# Altium schematic symbol library LED-Optocupler.SchLib: 114 symbols (part 1 of 2)
Pins are listed as number, name and electrical type; pins without a type are passive.

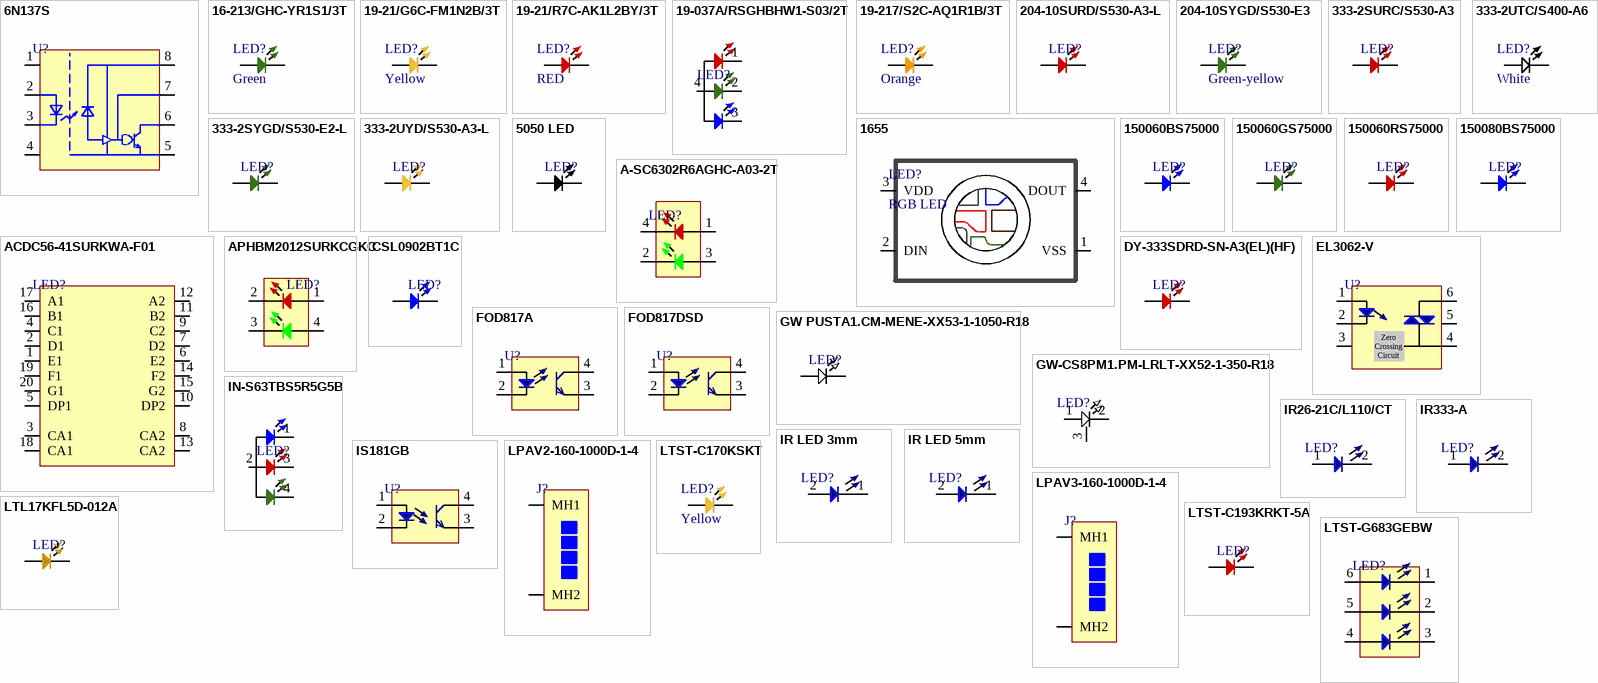
[diagram p0: symbols 6N137S to LTST-G683GEBW]

## 6N137S
designator U?
SOP-8 Logic Output Optoisolators ROHS; Manufacturer: UMW; Manufacturer Part Number: 6N137S; Package: SOP-8; LCSC Part Number: C5123515; Item Type: Optoisolators; ComponentLink1Description: LCSC; ComponentLink1URL: https://www.lcsc.com/product-detail/Logic-Output-Optoisolators_UMW-Youtai-Semiconductor-Co-Ltd-6N137S_C5123515.html
footprint SOP-8 (S Type)
pins: 1 NC, 2 A, 3 C, 4 NC, 5 GND, 6 VO, 7 VE, 8 VCC

## 16-213/GHC-YR1S1/3T
designator LED?, comment Green
Green 520~535nm 0402 Light Emitting Diodes (LED) RoHS; Manufacturer: Everlight Elec; Manufacturer Part Number: 16-213/GHC-YR1S1/3T; Luminous Intensity (IF=20mA): 112~285mcd; Package: 0402; Illumination Color: Green; Dominant Wavelength / Coordinate rank: 520~535nm; Mounting Type: Surface Mount; ComponentLink1Description: LCSC; ComponentLink1URL: https://www.lcsc.com/product-detail/Light-Emitting-Diodes-LED_Everlight-Elec-16-213-GHC-YR1S1-3T_C74338.html; LCSC Part Number: C74338; Item Type: LED
footprint LED-0402
pins: 1, 2

## 19-21/G6C-FM1N2B/3T
designator LED?, comment Yellow
Yellow-Green 572nm LED Indication - Discrete 2.05V 0603 (1608 Metric); Manufacturer: Everlight Elec; Manufacturer Part Number: 19-21/G6C-FM1N2B/3T; Package: 0603; LCSC Part Number: C93689; Item Type: LED; ComponentLink1Description: LCSC; ComponentLink1URL: https://www.lcsc.com/product-detail/Light-Emitting-Diodes-LED_Everlight-Elec-19-21-G6C-FM1N2B-3T_C93689.html
footprint LED-0603
pins: 1, 2

## 19-21/R7C-AK1L2BY/3T
designator LED?, comment RED
Red 632nm LED Indication - Discrete 2.05V 0603 (1608 Metric); Manufacturer: Everlight Elec; Manufacturer Part Number: 19-21/R7C-AK1L2BY/3T; Package: 0603; LCSC Part Number: C1322287; Item Type: LED; ComponentLink1Description: LCSC; ComponentLink1URL: https://www.lcsc.com/product-detail/Light-Emitting-Diodes-LED_Everlight-Elec-19-21-R7C-AK1L2BY-3T_C1322287.html
footprint LED-0603
pins: 1, 2

## 19-037A/RSGHBHW1-S03/2T
designator LED?
RGB 0606 Light Emitting Diodes (LED) ROHS; Manufacturer: Everlight Elec; Manufacturer Part Number: 19-037A/RSGHBHW1-S03/2T; Item Type: RGB LED; Package: 0606; LCSC Part Number: C282128; ComponentLink1Description: LCSC; ComponentLink1URL: https://www.lcsc.com/product-detail/Light-Emitting-Diodes-LED_Everlight-Elec-19-037A-RSGHBHW1-S03-2T_C282128.html
footprint LED-0606
pins: 1 -RED, 2 -GREEN, 3 -BLUE, 4 +

## 19-217/S2C-AQ1R1B/3T
designator LED?, comment Orange
0603(H=0.4mm) λD=600.5~612.5nm VR=5V VF=1.7V~2.2V IF=25mA PD=60mW; Manufacturer: Everlight; Manufacturer Part Number: 19-217/S2C-AQ1R1B/3T; Item Type: LED; Supplier 1: Digi-Key; RoHS: No; Category: LEDs; Supplier Part Number 1: 1080-19-217/S2C-AQ1R1B/3TTR-ND; LCSC Part Number: C146215; ComponentLink1Description: LCSC; ComponentLink1URL: https://www.lcsc.com/product-detail/Light-Emitting-Diodes-LED_Everlight-Elec-19-217-S2C-AQ1R1B-3T_C146215.html
footprint LED-0603
pins: 1, 2

## 204-10SURD/S530-A3-L
designator LED?
20mA 624nm -40℃~+85℃ Red 40° 3mm圆形灯头 60mW Plugin,D=3mm Light Emitting Diodes (LED) ROHS; Manufacturer: Everlight Elec; Manufacturer Part Number: 204-10SURD/S530-A3-L; Package: Plugin,D=3mm; LCSC Part Number: C99771; Item Type: LED; ComponentLink1Description: LCSC; ComponentLink1URL: https://www.lcsc.com/product-detail/Light-Emitting-Diodes-LED_Everlight-Elec-204-10SURD-S530-A3-L_C99771.html
footprint TH LED Red 3MM
pins: 1, 2

## 204-10SYGD/S530-E3
designator LED?, comment Green-yellow
LED Single Standard Yellow Green 573nm 25mA 2-Pin T-1 Bag; Manufacturer: Everlight; Manufacturer Part Number: 204-10SYGD/S530-E3; Viewing Angle: 45°; Luminous Intensity: 100mcd; Forward Voltage: 2.4V; Lens Style: Diffused,Colored; Power Dissipation: 60W; Number of Elements: 1; Reverse Voltage: 5V; Supplier: Digikey; Supplier Part Number: 1080-204-10SYGD/S530-E3TR-ND; RoHS: Yes; Pricing: 3000=0.10482, 5000=0.09847, 10000=0.09212, 25000=0.08449, 50000=0.08132, 100000=0.07941 (USD); Mounting Technology: Through Hole; Case/Package: T; Pins: 2; Min Operating Temperature: -40°C; Max Operating Temperature: 85°C; Forward Current: 25mA; Packaging: Tape and Reel; Dominant Wavelength: 573nm; Wavelength: 573nm; Length: 4mm; Depth: 4mm; Radiation Hardening: No; RoHS Compliant: Yes; ComponentLink1URL: https://datasheet.ciiva.com/26901/getdatasheetpartid-707371-26901329.pdf?src-supplier=Verical; ComponentLink1Description: https://datasheet.ciiva.com/26901/getdatasheetpartid-707371-26901329.pdf?src-supplier=Verical; LCSC Part Number: C85161; Item Type: LED
footprint TH LED Green 3MM
pins: 1, 2

## 333-2SURC/S530-A3
designator LED?
LED RED CLEAR 5MM ROUND T/H; Manufacturer: Everlight; Manufacturer Part Number: 333-2SURC/S530-A3; Item Type: LEDs; Supplier: Mouser; LCSC Part Number: C125756; RoHS: Yes; Stock: 2460; Pricing: 1=0.45, 10=0.259, 50=0.259, 100=0.127, 1000=0.11, 10000=0.089 (USD); ComponentLink1URL: https://datasheet.ciiva.com/14183/07501489-14183693.pdf?src-supplier=Distrelec; ComponentLink1Description: https://datasheet.ciiva.com/14183/07501489-14183693.pdf?src-supplier=Distrelec; ComponentLink2URL: https://datasheet.ciiva.com/2119/333-2surc-s530-a3-2119388.pdf?src-supplier=Digikey; ComponentLink2Description: https://datasheet.ciiva.com/2119/333-2surc-s530-a3-2119388.pdf?src-supplier=Digikey
footprint TH LED 5mm_
pins: 1, 2

## 333-2SYGD/S530-E2-L
designator LED?
333-2 Series Yellow Green 5 x 5.9 x 8.6 mm 30° 80 mcd Diffused 2.4 V LED; Manufacturer: Everlight; Manufacturer Part Number: 333-2SYGD/S530-E2-L; Supplier: Future Electronics; LCSC Part Number: C99697; Item Type: LED; Pricing: 500=0.0295, 2000=0.0286, 7500=0.0277, 20000=0.0271, 50000=0.0261 (USD); ComponentLink1URL: https://datasheet.octopart.com/333-2SYGD-S530-E2-L-Everlight-datasheet-27835065.pdf?src-supplier=Future+Electronics; ComponentLink1Description: https://datasheet.octopart.com/333-2SYGD-S530-E2-L-Everlight-datasheet-27835065.pdf?src-supplier=Future+Electronics
footprint TH LED 5mm Green
pins: 1, 2

## 333-2UTC/S400-A6
designator LED?, comment White
Colorless transparence -40℃~+85℃ White light 15° 100mW Plugin,D=5mm Light Emitting Diodes (LED) ROHS; Manufacturer: Everlight Elec; Manufacturer Part Number: 333-2UTC/S400-A6; Package: Plugin,D=5mm; LCSC Part Number: C99695; Item Type: LED; ComponentLink1Description: LCSC; ComponentLink1URL: https://www.lcsc.com/product-detail/Light-Emitting-Diodes-LED_Everlight-Elec-333-2UTC-S400-A6_C99695.html
footprint TH LED 5mm_
pins: 1 -, 2 +

## 333-2UYD/S530-A3-L
designator LED?
LED YELLOW DIFFUSED 5MM T/H; Manufacturer: Everlight; Manufacturer Part Number: 333-2UYD/S530-A3-L; Supplier: Digikey; LCSC Part Number: C88602; RoHS: No; Item Type: LED
footprint TH LED 5mm Yellow
pins: 1, 2

## 1655
designator LED?, comment RGB LED
ADDRESS LED DISC SERIAL RGB 1=10; Manufacturer: Adafruit Industries; Manufacturer Part Number: 1655; Color: Blue,Green,Red; Number of LEDs: 10; Item Type: RGB-LED; Supplier 1: Digi-Key; Stock 1: 2943; Mount: Surface Mount; Length: 5mm; Width: 5mm; ComponentLink1URL: https://cdn-shop.adafruit.com/product-files/1138/SK6812+LED+datasheet+.pdf?src-supplier=Digi-Key; ComponentLink1Description: https://cdn-shop.adafruit.com/product-files/1138/SK6812+LED+datasheet+.pdf?src-supplier=Digi-Key; ComponentLink2URL: http://www.mouser.com/ds/2/737/SK6812_LED_datasheet_-953546.pdf?src-supplier=Mouser; ComponentLink2Description: http://www.mouser.com/ds/2/737/SK6812_LED_datasheet_-953546.pdf?src-supplier=Mouser; Supplier Part Number 1: 1528-1104-ND; Pricing 1: 1=4.5 (USD)
footprint 1655 (RGB LED)
pins: 1 VSS, 2 DIN, 3 VDD, 4 DOUT

## 5050 LED
designator LED?
-; ComponentLink1Description: LCSC; ComponentLink1URL: *
footprint 5050 LED
pins: A, K

## 150060BS75000
designator LED?
LED BLUE CLEAR 0603 SMD; Manufacturer: Wurth Electronics; Manufacturer Part Number: 150060RS75000; Item Type: LEDs; Color: Red; Lens Color: Colorless; Viewing Angle: 140°; Lens Style: Clear,Flat,Rectangular; Luminous Intensity: 250mcd; Forward Current: 30mA; Forward Voltage: 2V; Wavelength: 625nm; Test Current: 20mA; Max Reverse Voltage (DC): 5V; Power Dissipation: 72mW; Lens Size: 0.7mm; Supplier: Rs; LCSC Part Number: C5197644; RoHS: Yes; Stock: 15900; Mounting Technology: Surface Mount; Case/Package: 0603; Case Code (Metric): 1608; Case Code (Imperial): 0603; Min Operating Temperature: -40°C; Max Operating Temperature: 85°C; Package Quantity: 1; Packaging: Cut Tape; Dominant Wavelength: 625nm; Series: WL-SMCW; Lens Transparency: Clear; Reverse Voltage: 5V; Length: 1.6mm; Width: 0.8mm; Height: 0.8mm; RoHS Compliant: Yes; Reach SVHC Compliant: Unknown; ComponentLink1URL: https://datasheet.ciiva.com/29563/150060rs75000-29563040.pdf?src-supplier=Digikey; ComponentLink1Description: https://datasheet.ciiva.com/29563/150060rs75000-29563040.pdf?src-supplier=Digikey; ComponentLink2URL: https://datasheet.ciiva.com/29279/759428-da-01-en-chipled-0603-w-kl-rot-150060rs75000-29279196.pdf?src-supplier=Conrad; ComponentLink2Description: https://datasheet.ciiva.com/29279/759428-da-01-en-chipled-0603-w-kl-rot-150060rs75000-29279196.pdf?src-supplier=Conrad
footprint LED-0603
pins: 1, 2

## 150060GS75000
designator LED?
LED GREEN CLEAR 0603 SMD; Manufacturer: Wurth Electronics; Manufacturer Part Number: 150060GS75000; Item Type: LEDs; Lens Color: Colorless; Wavelength: 520nm; Viewing Angle: 140°; Lens Style: Clear,Flat,Rectangular; Luminous Intensity: 430mcd; Forward Current: 30mA; Forward Voltage: 3.2V; Test Current: 20mA; Max Reverse Voltage (DC): 5V; Output Current: 10uA; Power Dissipation: 105mW; Lens Size: 0.7mm; Supplier: Rs; LCSC Part Number: C5252984; RoHS: Yes; Stock: 14000; Mounting Technology: Surface Mount; Case/Package: 0603; Color: Green; Case Code (Metric): 1608; Case Code (Imperial): 0603; Min Operating Temperature: -40°C; Max Operating Temperature: 85°C; Package Quantity: 1; Packaging: Cut Tape; Dominant Wavelength: 520nm; Series: WL-SMCW; Lens Transparency: Clear; Reverse Voltage: 5V; Length: 1.6mm; Width: 0.8mm; Height: 0.8mm; Lead Free: Lead Free; RoHS Compliant: Yes; Reach SVHC Compliant: Unknown; ComponentLink1URL: https://datasheet.ciiva.com/29562/150060gs75000-29562868.pdf?src-supplier=Digikey; ComponentLink1Description: https://datasheet.ciiva.com/29562/150060gs75000-29562868.pdf?src-supplier=Digikey; ComponentLink2URL: https://datasheet.ciiva.com/29279/759427-da-01-en-chipled-0603-w-kl-gruen-150060gs75000-29279201.pdf?src-supplier=Conrad; ComponentLink2Description: https://datasheet.ciiva.com/29279/759427-da-01-en-chipled-0603-w-kl-gruen-150060gs75000-29279201.pdf?src-supplier=Conrad; ComponentLink3URL: https://datasheet.ciiva.com/29562/150060gs75000-29562869.pdf?src-supplier=Digikey; ComponentLink3Description: https://datasheet.ciiva.com/29562/150060gs75000-29562869.pdf?src-supplier=Digikey; ComponentLink4URL: https://datasheet.ciiva.com/29562/150060gs75000-29562870.pdf?src-supplier=Digikey; ComponentLink4Description: https://datasheet.ciiva.com/29562/150060gs75000-29562870.pdf?src-supplier=Digikey
footprint LED-0603
pins: 1, 2

## 150060RS75000
designator LED?
LED RED CLEAR 0603 SMD; Manufacturer: Wurth Electronics; Manufacturer Part Number: 150060RS75000; Item Type: LEDs; Lens Color: Colorless; Viewing Angle: 140°; Lens Style: Clear,Flat,Rectangular; Luminous Intensity: 250mcd; Forward Current: 30mA; Forward Voltage: 2V; Wavelength: 625nm; Test Current: 20mA; Max Reverse Voltage (DC): 5V; Power Dissipation: 72mW; Lens Size: 0.7mm; Supplier: Rs; LCSC Part Number: C3030991; RoHS: Yes; Stock: 15900; Mounting Technology: Surface Mount; Case/Package: 0603; Color: Red; Case Code (Metric): 1608; Case Code (Imperial): 0603; Min Operating Temperature: -40°C; Max Operating Temperature: 85°C; Package Quantity: 1; Packaging: Cut Tape; Dominant Wavelength: 625nm; Series: WL-SMCW; Lens Transparency: Clear; Reverse Voltage: 5V; Length: 1.6mm; Width: 0.8mm; Height: 0.8mm; RoHS Compliant: Yes; Reach SVHC Compliant: Unknown; ComponentLink1URL: https://datasheet.ciiva.com/29563/150060rs75000-29563040.pdf?src-supplier=Digikey; ComponentLink1Description: https://datasheet.ciiva.com/29563/150060rs75000-29563040.pdf?src-supplier=Digikey; ComponentLink2URL: https://datasheet.ciiva.com/29279/759428-da-01-en-chipled-0603-w-kl-rot-150060rs75000-29279196.pdf?src-supplier=Conrad; ComponentLink2Description: https://datasheet.ciiva.com/29279/759428-da-01-en-chipled-0603-w-kl-rot-150060rs75000-29279196.pdf?src-supplier=Conrad
footprint LED-0603
pins: 1, 2

## 150080BS75000
designator LED?
LED BLUE CLEAR 0805 SMD; Manufacturer: Wurth Electronics; Manufacturer Part Number: 150080BS75000; Item Type: LEDs; Lens Color: Colorless; Luminous Intensity: 145mcd; Viewing Angle: 140°; Forward Voltage: 3.2V; Wavelength: 470nm; Lens Style: Clear,Flat,Rectangular; Forward Current: 30mA; Test Current: 20mA; Reverse Voltage: 5V; Power Dissipation: 105mW; Lens Size: 1.25mm; Supplier: Digikey; Supplier Part Number: 732-4982-1-ND; RoHS: Yes; Stock: 93649; Pricing: 1=0.18, 50=0.176, 100=0.151, 500=0.131 (USD); Mounting Technology: Surface Mount; Case/Package: 0805; Color: Blue; Case Code (Metric): 2012; Case Code (Imperial): 0805; Min Operating Temperature: -40°C; Max Operating Temperature: 85°C; Series: WL-SMCW; Package Quantity: 1; Packaging: Cut Tape; Dominant Wavelength: 470nm; Lens Transparency: Clear; Max Reverse Voltage (DC): 5V; Length: 2mm; Width: 1.25mm; Height: 0.8mm; RoHS Compliant: Yes; Reach SVHC Compliant: Unknown; Lead Free: Lead Free; ComponentLink1URL: https://datasheet.ciiva.com/22656/1740214-22656954.pdf?src-supplier=Element14; ComponentLink1Description: https://datasheet.ciiva.com/22656/1740214-22656954.pdf?src-supplier=Element14; ComponentLink2URL: https://datasheet.ciiva.com/23843/150080bs75000-23843251.pdf?src-supplier=Newark; ComponentLink2Description: https://datasheet.ciiva.com/23843/150080bs75000-23843251.pdf?src-supplier=Newark; ComponentLink3URL: https://datasheet.ciiva.com/29279/759433-da-01-en-chipled-0805-w-kl-blau-150080bs75000-29279203.pdf?src-supplier=Conrad; ComponentLink3Description: https://datasheet.ciiva.com/29279/759433-da-01-en-chipled-0805-w-kl-blau-150080bs75000-29279203.pdf?src-supplier=Conrad; ComponentLink4URL: https://datasheet.ciiva.com/29562/150080bs75000-29562923.pdf?src-supplier=Digikey; ComponentLink4Description: https://datasheet.ciiva.com/29562/150080bs75000-29562923.pdf?src-supplier=Digikey; ComponentLink5URL: https://datasheet.ciiva.com/29562/150080bs75000-29562922.pdf?src-supplier=Digikey; ComponentLink5Description: https://datasheet.ciiva.com/29562/150080bs75000-29562922.pdf?src-supplier=Digikey
footprint LED-0805
pins: 1, 2

## A-SC6302R6AGHC-A03-2T
designator LED?
Colorless transparent lens -40℃~+85℃ Positive Stick Red,Green 120° SMD-4P,3.5x2.8mm LED Indication - Discrete ROHS; Manufacturer: Amicc; Manufacturer Part Number: A-SC6302R6AGHC-A03-2T; Package: SMD-4P,3.5x2.8mm; LCSC Part Number: C5355456; Item Type: LED; ComponentLink1Description: LCSC; ComponentLink1URL: https://jlcpcb.com/partdetail/Amicc-A_SC6302R6AGHC_A032T/C5355456
footprint A-SC6302R6AGHC-A03-2T
pins: 1, 2, 3, 4

## ACDC56-41SURKWA-F01
designator LED?
DISPLAY 7SEG 0.56" DBL RED 20SMD; Manufacturer: Kingbright; Manufacturer Part Number: ACDC56-41SURKWA-F01; Item Type: 7-Segment LED; Supplier: Digikey; Supplier Part Number: ACDC56-41SURKWA-F01-ND; RoHS: Yes; Category: LED Displays; Pricing: 2000=2.31795 (USD); ComponentLink1URL: https://datasheet.ciiva.com/12423/acdc56-41surkwa-f01-81627-12423377.pdf?src-supplier=Mouser; ComponentLink1Description: https://datasheet.ciiva.com/12423/acdc56-41surkwa-f01-81627-12423377.pdf?src-supplier=Mouser; ComponentLink2URL: https://datasheet.ciiva.com/2105/acdc56-41surkwa-f01-2105135.pdf?src-supplier=Digikey; ComponentLink2Description: https://datasheet.ciiva.com/2105/acdc56-41surkwa-f01-2105135.pdf?src-supplier=Digikey
footprint ACDC56-41SURKWA-F01
pins: 1 E1, 2 D1, 3 CA1, 4 C1, 5 DP1, 6 E2, 7 D2, 8 CA2, 9 C2, 10 DP2, 11 B2, 12 A2, 13 CA2, 14 F2, 15 G2, 16 B1, 17 A1, 18 CA1, 19 F1, 20 G1

## APHBM2012SURKCGKC
designator LED?
LED GREEN/RED CLEAR 2012 SMD; Manufacturer: Kingbright; Manufacturer Part Number: APHBM2012SURKCGKC; Item Type: LEDs; Power Dissipation: 75mW; Reverse Voltage: 5V; Supplier: Digikey; LCSC Part Number: C5553822; RoHS: Yes; Stock: 110064; Pricing: 1=0.54, 10=0.315, 100=0.2018, 500=0.1577, 1000=0.14419 (USD); ComponentLink1URL: https://datasheet.ciiva.com/12403/aphbm2012surkcgkc-72097-12403908.pdf?src-supplier=Mouser; ComponentLink1Description: https://datasheet.ciiva.com/12403/aphbm2012surkcgkc-72097-12403908.pdf?src-supplier=Mouser; ComponentLink2URL: https://datasheet.ciiva.com/16494/aphbm2012surkcgkc-16494094.pdf?src-supplier=Future+Electronics; ComponentLink2Description: https://datasheet.ciiva.com/16494/aphbm2012surkcgkc-16494094.pdf?src-supplier=Future+Electronics; ComponentLink3URL: https://datasheet.ciiva.com/2121/aphbm2012surkcgkc-2121185.pdf?src-supplier=Digikey; ComponentLink3Description: https://datasheet.ciiva.com/2121/aphbm2012surkcgkc-2121185.pdf?src-supplier=Digikey; ComponentLink4URL: https://datasheet.ciiva.com/14604/70062825-14604012.pdf?src-supplier=Allied+Electronics; ComponentLink4Description: https://datasheet.ciiva.com/14604/70062825-14604012.pdf?src-supplier=Allied+Electronics; ComponentLink5URL: https://datasheet.ciiva.com/2121/aphbm2012surkcgkc-2121186.pdf?src-supplier=Digikey; ComponentLink5Description: https://datasheet.ciiva.com/2121/aphbm2012surkcgkc-2121186.pdf?src-supplier=Digikey; ComponentLink6URL: https://datasheet.ciiva.com/2121/aphbm2012surkcgkc-2121187.pdf?src-supplier=Digikey; ComponentLink6Description: https://datasheet.ciiva.com/2121/aphbm2012surkcgkc-2121187.pdf?src-supplier=Digikey
footprint APHBM2012SURKCGKC
pins: 1, 2, 3, 4

## CSL0902BT1C
designator LED?
LED BLUE CLEAR 0603 SMD; Item Type: LED; ComponentLink1Description: LCSC; Supplier: Rs; Supplier Part Number: 2491101; RoHS: No; Stock: 1975; Pricing: 25=0.537, 50=0.527, 100=0.355, 250=0.349, 1000=0.341 (GBP)
footprint LED-0603
pins: 1, 2

## DY-333SDRD-SN-A3(EL)(HF)
designator LED?
D=5mm LED Indication - Discrete ROHS; Manufacturer: TONYU; Manufacturer Part Number: DY-333SDRD-SN-A3(EL)(HF); Supplier: LCSC; LCSC Part Number: C7470717; RoHS: No; Item Type: LED; Pricing: 10=0.0326, 100=0.0264, 500=0.0221, 1000=0.0197, 5000=0.0178, 10000=0.0169 (USD)
footprint TH LED 5mm_
pins: 1, 2

## EL3062-V
designator U?
Optocoupler Triac AC-OUT 1-CH 600VDRM 6-Pin PDIP Tube; Manufacturer: Everlight; Manufacturer Part Number: EL3062-V; Max Supply Voltage: 1.5V; Number of Channels: 1; RMS Current (Irms): 100mA; Hold Current: 280uA; Approvals: UL,CSA,VDE,NEMKO,FIMKO,SEMKO,DEMKO; Item Type: Optoisolator; Supplier: Digi-Key; Supplier Part Number: EL3062-V-ND; RoHS: Yes; Category: Uncategorized; Pricing: 195=0.75805 (USD); Mounting Technology: Through Hole; Case/Package: DIP; Pins: 6; Min Operating Temperature: -55°C; Max Operating Temperature: 100°C; Packaging: Rail/Tube; Package Quantity: 5; Forward Voltage: 1.5V; Series: -; Radiation Hardening: No; RoHS Compliant: Yes; ComponentLink1URL: https://datasheet.ciiva.com/2093/el30xx-series-2093622.pdf?src-supplier=Digi-Key; ComponentLink1Description: https://datasheet.ciiva.com/2093/el30xx-series-2093622.pdf?src-supplier=Digi-Key
footprint 6 Pin Dip
pins: 1 An, 2 Ca, 3 NC, 4 Terminal, 5 Substrate, 6 Terminal
text: Zero Crossing Circuit

## FOD817A
designator U?
OPTOISOLATOR 5KV TRANSISTOR 4DIP; Manufacturer: ON Semiconductor / Fairchild; Manufacturer Part Number: FOD817A; Item Type: IC; Supplier: Future Electronics; LCSC Part Number: C900909; RoHS: Yes; Stock: 9100; Pricing: 100=0.0832, 500=0.0801, 2500=0.0771, 10000=0.0747, 25000=0.0712 (USD); ComponentLink1URL: https://datasheet.ciiva.com/25620/0900766b810e24fa-25620684.pdf?src-supplier=Rs; ComponentLink1Description: https://datasheet.ciiva.com/25620/0900766b810e24fa-25620684.pdf?src-supplier=Rs; ComponentLink2URL: https://datasheet.ciiva.com/15118/getdatasheetpartid-67083-15118459.pdf?src-supplier=Verical; ComponentLink2Description: https://datasheet.ciiva.com/15118/getdatasheetpartid-67083-15118459.pdf?src-supplier=Verical; ComponentLink3URL: https://datasheet.ciiva.com/27056/2016920-27056231.pdf?src-supplier=Jameco; ComponentLink3Description: https://datasheet.ciiva.com/27056/2016920-27056231.pdf?src-supplier=Jameco; ComponentLink4URL: https://datasheet.ciiva.com/12239/fod817a-12239227.pdf?src-supplier=Mouser; ComponentLink4Description: https://datasheet.ciiva.com/12239/fod817a-12239227.pdf?src-supplier=Mouser; ComponentLink5URL: https://datasheet.ciiva.com/8095/fod817d-8095131.pdf?src-supplier=Avnet; ComponentLink5Description: https://datasheet.ciiva.com/8095/fod817d-8095131.pdf?src-supplier=Avnet; ComponentLink6URL: https://datasheet.ciiva.com/2086/fod814a-2086034.pdf?src-supplier=Digikey; ComponentLink6Description: https://datasheet.ciiva.com/2086/fod814a-2086034.pdf?src-supplier=Digikey; ComponentLink7URL: https://datasheet.ciiva.com/16741/fod817-16741992.pdf?src-supplier=Future+Electronics; ComponentLink7Description: https://datasheet.ciiva.com/16741/fod817-16741992.pdf?src-supplier=Future+Electronics
footprint DIP-4
pins: 1 An, 2 Ca, 3 E, 4 C

## FOD817DSD
designator U?
OPTOISOLATOR 5KV TRANSISTOR 4SMD; Manufacturer: ON Semiconductor / Fairchild; Manufacturer Part Number: FOD817DSD; Item Type: Optocouplers; Supplier: Future Electronics; LCSC Part Number: C241832; RoHS: Yes; Stock: 194000; Pricing: 1000=0.153, 3000=0.148, 5000=0.146, 15000=0.142, 25000=0.138 (USD); ComponentLink1URL: https://datasheet.ciiva.com/2085/fod817-2085872.pdf?src-supplier=Digikey; ComponentLink1Description: https://datasheet.ciiva.com/2085/fod817-2085872.pdf?src-supplier=Digikey; ComponentLink2URL: https://datasheet.ciiva.com/30520/2018343-30520890.pdf?src-supplier=Jameco; ComponentLink2Description: https://datasheet.ciiva.com/30520/2018343-30520890.pdf?src-supplier=Jameco; ComponentLink3URL: https://datasheet.ciiva.com/15118/getdatasheetpartid-110546-15118613.pdf?src-supplier=Verical; ComponentLink3Description: https://datasheet.ciiva.com/15118/getdatasheetpartid-110546-15118613.pdf?src-supplier=Verical; ComponentLink4URL: https://datasheet.ciiva.com/2085/fod817d-2085873.pdf?src-supplier=Digikey; ComponentLink4Description: https://datasheet.ciiva.com/2085/fod817d-2085873.pdf?src-supplier=Digikey; ComponentLink5URL: https://datasheet.ciiva.com/2085/fod817d-2085874.pdf?src-supplier=Digikey; ComponentLink5Description: https://datasheet.ciiva.com/2085/fod817d-2085874.pdf?src-supplier=Digikey; ComponentLink6URL: https://datasheet.ciiva.com/8095/fod817d-8095134.pdf?src-supplier=Avnet; ComponentLink6Description: https://datasheet.ciiva.com/8095/fod817d-8095134.pdf?src-supplier=Avnet; ComponentLink7URL: https://datasheet.ciiva.com/17277/fod817-17277350.pdf?src-supplier=Future+Electronics; ComponentLink7Description: https://datasheet.ciiva.com/17277/fod817-17277350.pdf?src-supplier=Future+Electronics
footprint FOD817DSD
pins: 1 An, 2 Ca, 3 E, 4 C

## GW PUSTA1.CM-MENE-XX53-1-1050-R18
designator LED?
LED OSCONIQ COOL WHT 5000K 3SMD; Manufacturer: ams-OSRAM USA INC.; Manufacturer Part Number: GW PUSTA1.CM-MENE-XX53-1-1050-R18; Package: Custom; Item Type: LED; ComponentLink1Description: Digikey; ComponentLink1URL: https://www.digikey.nl/en/products/detail/ams-osram-usa-inc/GW-PUSTA1-CM-MENE-XX53-1-1050-R18/11643254
footprint GW PUSTA1.CM-MENE-XX53-1-1050-R18
pins: 1 AN+, 2 CA-

## GW-CS8PM1.PM-LRLT-XX52-1-350-R18
designator LED?, comment WHITE  (value not drawn)
White LED 350mA Cool 5700K 80° 1212; Manufacturer: OSRAM Opto Semicon; Manufacturer Part Number: GW CS8PM1.PM-LRLT-XX52-1-350-R18; Package: SMD3030; LCSC Part Number: C2830560; Item Type: LED; ComponentLink1Description: LCSC; ComponentLink1URL: https://www.lcsc.com/product-detail/LED-Indication-Discrete_OSRAM-Opto-Semicon-GW-CS8PM1-PM-LRLT-XX52-1-350-R18_C2830560.html
footprint GW CS8PM1.PM-LRLT-XX52-1-350-R18.
pins: 1, 2, 3

## IN-S63TBS5R5G5B
designator LED?
LED RGB CLEAR 0603 SMD R/A; Manufacturer: Inolux; Manufacturer Part Number: IN-S63TBS5R5G5B; Supplier: Mouser; Supplier Part Number: 743-IN-S63TBS5R5G5B; RoHS: No; Category: LEDs; Stock: 12751; Pricing: 1=0.5, 10=0.328, 50=0.328, 100=0.218, 1000=0.152, 10000=0.141 (USD); Item Type: LED
footprint IN-S63TBS5R5G5B
pins: 1 -BLUE, 2 +, 3 -RED, 4 -GREEN

## IR26-21C/L110/CT
designator LED?
4.25mW/sr @ 20mA 940nm 1.2V 65mA 1206 Infrared (IR) LEDs ROHS; Manufacturer: Everlight Elec; Manufacturer Part Number: IR26-21C/L110/CT; ComponentLink1Description: LCSC; ComponentLink1URL: https://www.lcsc.com/product-detail/Infrared-IR-LEDs_Everlight-Elec-IR26-21C-L110-CT_C131280.html; Package: 1206
footprint LED_1206
pins: 1, 2

## IR333-A
designator LED?
EMITTER IR 940NM 100MA RADIAL; Manufacturer: Everlight; Manufacturer Part Number: IR333-A; Forward Current: 50mA; Forward Voltage: 1.2V; Viewing Angle: 20°; Lens Style: Diffused,Colored,Circular; Number of LEDs: 1; Test Current: 20mA; Power Dissipation: 100mW; Reverse Voltage: 5V; Item Type: Infrared LED; Supplier 1: Digi-Key; RoHS: Yes; Category: LEDs; Stock 1: 73854; Pricing 1: 1=0.54000, 10=0.33000, 100=0.18950, 1000=0.14832, 2000=0.13596, 5000=0.12360, 10000=0.11536, 25000=0.11124 (USD); Mount: Through Hole; Case/Package: Radial; Number of Pins: 2; Min Operating Temperature: -40°C; Max Operating Temperature: 85°C; Packaging: Bulk; Wavelength: 940nm; Package Quantity: 500; Number of Elements: 1; Orientation: Top View; Series: -; Max Power Dissipation: 100mW; Length: 5.9mm; Depth: 5.9mm; RoHS Compliant: Yes; Lead Free: Lead Free; ComponentLink1URL: https://datasheet.ciiva.com/2107/201407061516067600-2107736.pdf?src-supplier=Digi-Key; ComponentLink1Description: https://datasheet.ciiva.com/2107/201407061516067600-2107736.pdf?src-supplier=Digi-Key; ComponentLink2URL: https://datasheet.ciiva.com/48438/ir333-a-eng-tds-48438869.pdf?src-supplier=Distrelec; ComponentLink2Description: https://datasheet.ciiva.com/48438/ir333-a-eng-tds-48438869.pdf?src-supplier=Distrelec; Supplier Part Number 1: 1080-1080-ND; LCSC Part Number: C95407
footprint IR333_A
footprint IR333-A Cut
pins: 1, 2

## IR LED 3mm
designator LED?
IR Led 3mm Through; ComponentLink1Description: Aliexpress; ComponentLink1URL: https://nl.aliexpress.com/item/32950109432.html?spm=a2g0o.productlist.0.0.2d9749ecxdTGvK&algo_pvid=f3c88197-d0dd-4360-badc-ef5a9d1d435b&algo_exp_id=f3c88197-d0dd-4360-badc-ef5a9d1d435b-1&pdp_ext_f=%7B%22sku_id%22%3A%2266309321327%22%7D
footprint TH LED 3mm_
pins: 1, 2

## IR LED 5mm
designator LED?
IR Led 5mm Through; ComponentLink1Description: Aliexpress; ComponentLink1URL: https://nl.aliexpress.com/item/32950109432.html?spm=a2g0o.productlist.0.0.2d9749ecxdTGvK&algo_pvid=f3c88197-d0dd-4360-badc-ef5a9d1d435b&algo_exp_id=f3c88197-d0dd-4360-badc-ef5a9d1d435b-1&pdp_ext_f=%7B%22sku_id%22%3A%2266309321327%22%7D
footprint TH LED 5mm_
pins: 1, 2

## IS181GB
designator U?
Optoisolator Transistor Output 3750Vrms 1 Channel; Manufacturer: Isocom; Manufacturer Part Number: IS181GB; Forward Current: 50mA; Reverse Breakdown Voltage: 6V; Isolation Voltage: 3.75kV; Rise Time: 18000ns; Power Dissipation: 170mW; Number of Elements: 1; Collector Emitter Saturation Voltage: 200mV; Forward Voltage: 1.4V; Collector Emitter Voltage (VCEO): 80V; Current Transfer Ratio: 600%; Item Type: Optocoupler; Supplier 1: Arrow Electronics; RoHS: Yes; Category: Optocouplers; Stock 1: 2922; Pricing 1: 1=0.55080, 10=0.34190, 25=0.33860, 50=0.33530, 100=0.19360, 250=0.19160, 500=0.18960, 1000=0.14750 (USD); Mount: Surface Mount; Case/Package: SMD/SMT; Number of Pins: 4; Min Operating Temperature: -55°C; Max Operating Temperature: 100°C; Fall Time: 18000ns; Radiation Hardening: No; Lead Free: Lead Free; RoHS Compliant: Yes; ComponentLink1URL: https://datasheet.ciiva.com/26895/getdatasheetpartid-624485-26895717.pdf?src-supplier=Verical; ComponentLink1Description: https://datasheet.ciiva.com/26895/getdatasheetpartid-624485-26895717.pdf?src-supplier=Verical; ComponentLink2URL: https://datasheet.ciiva.com/29301/183289-da-01-en-optokoppler-is181-gb-29301106.pdf?src-supplier=Conrad; ComponentLink2Description: https://datasheet.ciiva.com/29301/183289-da-01-en-optokoppler-is181-gb-29301106.pdf?src-supplier=Conrad; Supplier Part Number 1: IS181GB; LCSC Part Number: C84196
footprint SOP-4_2.54
pins: 1 An, 2 Ca, 3 E, 4 C

## LPAV2-160-1000D-1-4
designator J?
LED INDICATION, ROUND, CLEAR, DO; Manufacturer: Bivar; Manufacturer Part Number: LPAV2-160-1000D-1-4; Item Type: Light Pipe; Lens Style: Round,Domed; Lens Size: 2mm; Supplier: Digikey; Supplier Part Number: 492-LPAV2-160-1000D-1-4-ND; RoHS: No; Pricing: 1=3.49, 10=2.553, 100=2.0006, 500=1.75802, 1000=1.67907, 2000=1.61225, 5000=1.53946 (USD); Mounting Technology: Press-Fit,Board; Color: Clear; Series: -; ComponentLink1URL: https://cdn2.hubspot.net/hubfs/5642389/LPAV2-160-1000D-1-4_A.pdf?src-supplier=Digikey; ComponentLink1Description: https://cdn2.hubspot.net/hubfs/5642389/LPAV2-160-1000D-1-4_A.pdf?src-supplier=Digikey
footprint LPAV2-160-1000D-1-4
pins: MH1, MH2

## LPAV3-160-1000D-1-4
designator J?
LED INDICATION, ROUND, CLEAR, DO; Manufacturer: Bivar; Manufacturer Part Number: LPAV3-160-1000D-1-4; Item Type: Light Pipe; Lens Style: Round,Domed; Lens Size: 3mm; Supplier: Digikey; Supplier Part Number: 492-LPAV3-160-1000D-1-4-ND; RoHS: No; Pricing: 1=3.89, 10=2.865, 100=2.2565, 500=1.98982, 1000=1.90308, 2000=1.82968, 5000=1.74974 (USD); Mounting Technology: Press-Fit,Board; Series: -; ComponentLink1URL: https://cdn2.hubspot.net/hubfs/5642389/LPAV3-160-1000D-1-4_A.pdf?src-supplier=Digikey; ComponentLink1Description: https://cdn2.hubspot.net/hubfs/5642389/LPAV3-160-1000D-1-4_A.pdf?src-supplier=Digikey
footprint LPAV3-160-1000D-1-4
pins: MH1, MH2

## LTL17KFL5D-012A
designator LED?
20mA -40℃~+80℃ 605nm Amber Color 50° 3mm圆形灯头 75mW Plugin,D=3mm Light Emitting Diodes (LED) ROHS; Manufacturer: Lite-On; Manufacturer Part Number: LTL17KFL5D-012A; Package: Plugin,D=3mm; LCSC Part Number: C575510; Item Type: LED; ComponentLink1Description: LCSC; ComponentLink1URL: https://www.lcsc.com/product-detail/Light-Emitting-Diodes-LED_Lite-On-LTL17KFL5D-012A_C575510.html
footprint TH LED 3mm_
pins: 1 -, 2 +

## LTST-C170KSKT
designator LED?, comment Yellow
LED YELLOW CLEAR SMD; Manufacturer: Vishay Lite-On; Manufacturer Part Number: LTST-C170KSKT; Lens Color: Colorless; Forward Voltage: 2.4V; Forward Current: 30mA; Luminous Intensity: 112mcd; Viewing Angle: 130°; Lens Style: Diffused,Colorless,Rectangular,Clear; Power Rating: 75mW; Dominant Wavelength: 587nm; Test Current: 20mA; Number of Elements: 1; Wavelength: 588nm; Reverse Voltage: 5V; Supplier 1: Digi-Key; RoHS: Yes; Category: LEDs; Stock 1: 4224; Pricing 1: 1=0.31000, 10=0.16900, 100=0.07860, 500=0.07260, 1000=0.05687 (USD); Mount: Surface Mount; Case/Package: 0805; Number of Pins: 2; Color: Yellow; Case Code (Metric): 2012; Case Code (Imperial): 0805; Min Operating Temperature: -55°C; Max Operating Temperature: 85°C; Packaging: Tape and Reel; Package Quantity: 1; Illumination Color: Yellow; Lens Transparency: Clear; Power Dissipation: 75mW; Number of LEDs: 1; Series: CHIPLED 0805; Length: 2mm; Width: 1.25mm; Height: 1.1mm; Depth: 1.25mm; Radiation Hardening: No; Lead Free: Lead Free; RoHS Compliant: Yes; ComponentLink1URL: https://datasheet.ciiva.com/11774/0900766b80dc027c-11774116.pdf?src-supplier=RSComponents; ComponentLink1Description: https://datasheet.ciiva.com/11774/0900766b80dc027c-11774116.pdf?src-supplier=RSComponents; ComponentLink2URL: https://datasheet.ciiva.com/12400/lite-on-ltst-c170kskt-187240-12400806.pdf?src-supplier=Mouser; ComponentLink2Description: https://datasheet.ciiva.com/12400/lite-on-ltst-c170kskt-187240-12400806.pdf?src-supplier=Mouser; ComponentLink3URL: https://datasheet.ciiva.com/16203/ltst-c170kskt-16203829.pdf?src-supplier=Future+Electronics; ComponentLink3Description: https://datasheet.ciiva.com/16203/ltst-c170kskt-16203829.pdf?src-supplier=Future+Electronics; ComponentLink4URL: https://datasheet.ciiva.com/15118/getdatasheetpartid-214541-15118098.pdf?src-supplier=Verical; ComponentLink4Description: https://datasheet.ciiva.com/15118/getdatasheetpartid-214541-15118098.pdf?src-supplier=Verical; ComponentLink5URL: https://datasheet.ciiva.com/2110/s-110-ltst-c170kskt-2110046.pdf?src-supplier=Digi-Key; ComponentLink5Description: https://datasheet.ciiva.com/2110/s-110-ltst-c170kskt-2110046.pdf?src-supplier=Digi-Key; ComponentLink6URL: https://datasheet.ciiva.com/2110/s-110-ltst-c170kskt-2110045.pdf?src-supplier=Digi-Key; ComponentLink6Description: https://datasheet.ciiva.com/2110/s-110-ltst-c170kskt-2110045.pdf?src-supplier=Digi-Key; ComponentLink7URL: https://datasheet.ciiva.com/2110/s-110-ltst-c170kskt-2110047.pdf?src-supplier=Digi-Key; ComponentLink7Description: https://datasheet.ciiva.com/2110/s-110-ltst-c170kskt-2110047.pdf?src-supplier=Digi-Key; Supplier Part Number 1: 160-1416-1-ND; LCSC Part Number: C125091; Item Type: LED
footprint LED-0805
pins: 1, 2

## LTST-C193KRKT-5A
designator LED?
LED RED CLEAR CHIP SMD; Manufacturer: Vishay Lite-On; Manufacturer Part Number: LTST-C193KRKT-5A; Item Type: LEDs; Lens Color: Colorless; Viewing Angle: 130°; Lens Style: Flat,Diffused,Colorless,Rectangular,Clear; Luminous Intensity: 45mcd; Forward Current: 30mA; Forward Voltage: 2.3V; Test Current: 5mA; Dominant Wavelength: 631nm; Number of Elements: 1; Power Dissipation: 75mW; Reverse Voltage: 5V; Lens Size: 0.8mm; Supplier: Digikey; Supplier Part Number: 160-1830-1-ND; RoHS: Yes; Stock: 241564; Pricing: 1=0.39, 10=0.211, 100=0.0981, 500=0.0906, 1000=0.07097, 2000=0.06946 (USD); Mounting Technology: Surface Mount; Case/Package: 0603; Pins: 2; Color: Red; Case Code (Metric): 1608; Case Code (Imperial): 0603; Min Operating Temperature: -55°C; Max Operating Temperature: 85°C; Package Quantity: 3000; Packaging: Tape and Reel; Illumination Color: Red; Lens Transparency: Clear; Number of LEDs: 1; Series: -; Wavelength: 631nm; Length: 1.6mm; Width: 0.8mm; Height: 0.45mm; Depth: 0.8mm; Radiation Hardening: No; Lead Free: Lead Free; RoHS Compliant: Yes; ComponentLink1URL: https://datasheet.ciiva.com/11775/0900766b80dc0551-11775612.pdf?src-supplier=Rs; ComponentLink1Description: https://datasheet.ciiva.com/11775/0900766b80dc0551-11775612.pdf?src-supplier=Rs; ComponentLink2URL: https://datasheet.ciiva.com/4689/100-ltst-c193krkt-5a-61179-4689123.pdf?src-supplier=Mouser; ComponentLink2Description: https://datasheet.ciiva.com/4689/100-ltst-c193krkt-5a-61179-4689123.pdf?src-supplier=Mouser; ComponentLink3URL: https://datasheet.ciiva.com/16210/ltst-c193krkt-5a-16210822.pdf?src-supplier=Future+Electronics; ComponentLink3Description: https://datasheet.ciiva.com/16210/ltst-c193krkt-5a-16210822.pdf?src-supplier=Future+Electronics; ComponentLink4URL: https://datasheet.ciiva.com/2110/s-110-ltst-c193krkt-5a-2110272.pdf?src-supplier=Digikey; ComponentLink4Description: https://datasheet.ciiva.com/2110/s-110-ltst-c193krkt-5a-2110272.pdf?src-supplier=Digikey
footprint LED-0603
pins: 1, 2

## LTST-G683GEBW
designator LED?
Standard LEDs - SMD SMD LED Red/Grn/Blue 625/1550/260 mcd; Manufacturer: Vishay Lite-On; Manufacturer Part Number: LTST-G683GEBW; Color: Blue,Green,Red; Luminous Intensity: 267.5mcd; Viewing Angle: 120°; Lens Style: Diffused,Circular; Forward Voltage: 3.8V; Forward Current: 20mA; Lens Transparency: Diffused; Dominant Wavelength: 525nm; Number of Elements: 3; Reverse Voltage: 5V; Supplier 1: Mouser; RoHS: Yes; Category: LEDs; Stock 1: 43790; Pricing 1: 1=0.51000, 10=0.46000, 50=0.46000, 100=0.34600, 500=0.29900, 1000=0.23600, 2000=0.21200, 10000=0.20900, 24000=0.20400, 50000=0.19700 (USD); Mount: Surface Mount; Case/Package: PLCC; Number of Pins: 6; Min Operating Temperature: -40°C; Max Operating Temperature: 85°C; Packaging: Tape and Reel; Package Quantity: 2000; Test Current: 20mA; Number of LEDs: 3; Series: -; Length: 3.3mm; Width: 3mm; Height: 1.45mm; Depth: 3.2mm; Radiation Hardening: No; Lead Free: Lead Free; RoHS Compliant: Yes; ComponentLink1URL: https://datasheet.ciiva.com/2959/s-110-ltst-g683gebw-2959963.pdf?src-supplier=Digi-Key; ComponentLink1Description: https://datasheet.ciiva.com/2959/s-110-ltst-g683gebw-2959963.pdf?src-supplier=Digi-Key; ComponentLink2URL: https://datasheet.ciiva.com/12403/s-110-ltst-g683gebw-337108-12403142.pdf?src-supplier=Mouser; ComponentLink2Description: https://datasheet.ciiva.com/12403/s-110-ltst-g683gebw-337108-12403142.pdf?src-supplier=Mouser; Supplier Part Number 1: 859-LTST-G683GEBW; LCSC Part Number: C575501
footprint LTST-G683GEBW
pins: 1 -, 2 -, 3 -, 4 +, 5 +, 6 +

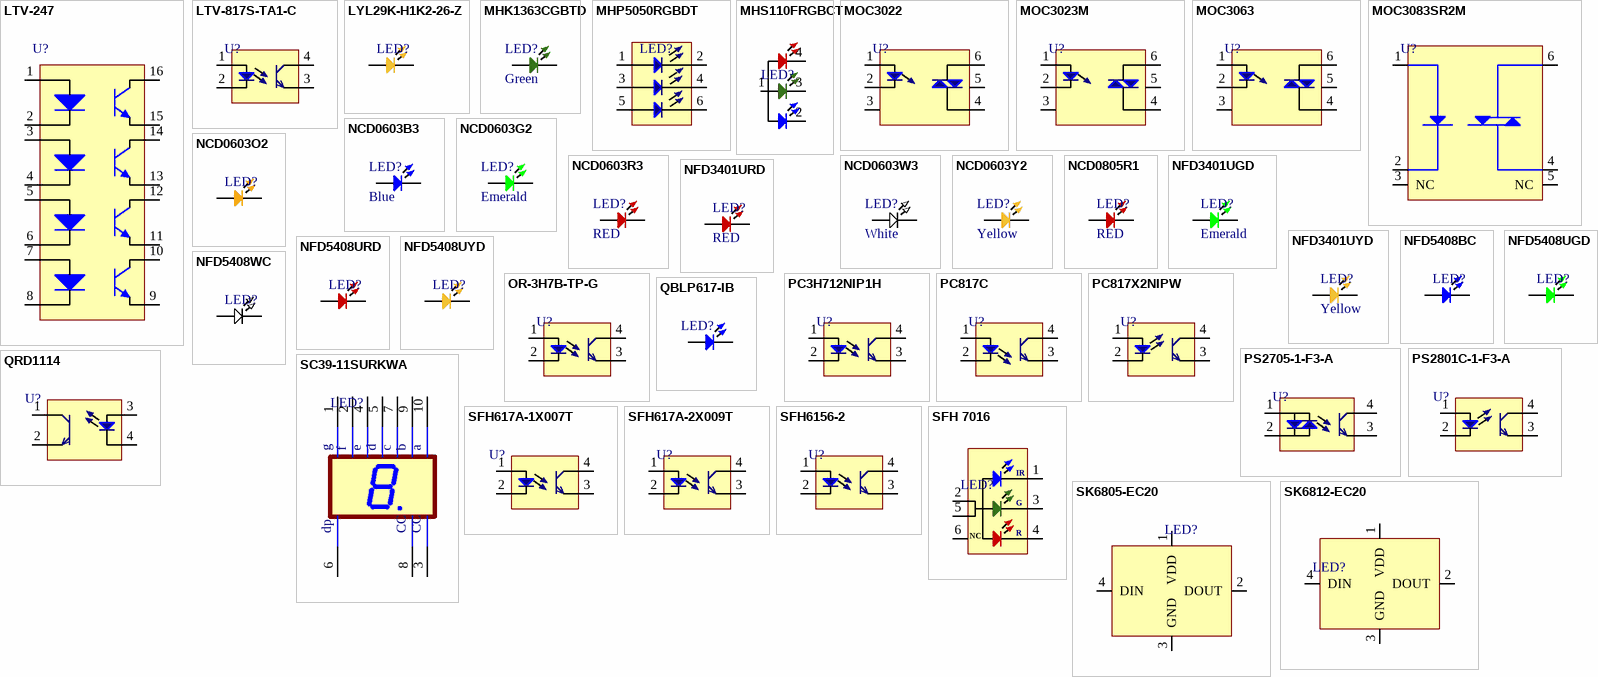
[diagram p1: symbols LTV-247 to SK6812-EC20]

## LTV-247
designator U?
OPTOISO 3.75KV 4CH TRANS 16SO; Manufacturer: Vishay Lite-On; Manufacturer Part Number: LTV-247; Number of Channels: 4; Collector Emitter Voltage (VCEO): 80V; Reverse Breakdown Voltage: 6V; Forward Voltage: 1.2V; Forward Current: 20mA; Max Power Dissipation: 200mW; Output Current per Channel: 50mA; Collector Emitter Saturation Voltage: 400mV; Power Dissipation: 170mW; Current Transfer Ratio: 600%; Item Type: PhotoTransistor; Supplier 1: Future Electronics; RoHS: Yes; Category: Optocouplers; Stock 1: 178000; Pricing 1: 2000=0.77000 (USD); Mount: Surface Mount; Case/Package: SMD/SMT; Number of Pins: 16; Min Operating Temperature: -55°C; Max Operating Temperature: 110°C; Package Quantity: 2000; Packaging: Tape and Reel; Max Output Voltage: 80V; Max Collector Current: 50mA; Number of Elements: 4; Max Input Current: 50mA; Radiation Hardening: No; RoHS Compliant: Yes; ComponentLink1URL: https://datasheet.ciiva.com/24015/ltv-247-256860-24015561.pdf?src-supplier=Mouser; ComponentLink1Description: https://datasheet.ciiva.com/24015/ltv-247-256860-24015561.pdf?src-supplier=Mouser; ComponentLink2URL: https://datasheet.ciiva.com/29730/ltv-214-244-29730320.pdf?src-supplier=Digi-Key; ComponentLink2Description: https://datasheet.ciiva.com/29730/ltv-214-244-29730320.pdf?src-supplier=Digi-Key; Supplier Part Number 1: 3051235; LCSC Part Number: C115451; ComponentLink3Description: LCSC; ComponentLink3URL: https://www.lcsc.com/product-detail/Optocouplers-Phototransistor-Output_Lite-On-LTV-247_C115451.html
footprint 16-SO
pins: 1 A, 2 K, 3 A, 4 K, 5 A, 6 K, 7 A, 8 K, 9 E, 10 C, 11 E, 12 C, 13 E, 14 C, 15 E, 16 C

## LTV-817S-TA1-C
designator U?
OPTOISOLATOR 5KV 1CH TRANS 4-SMD; Manufacturer: Vishay Lite-On; Manufacturer Part Number: LTV-817S-TA1-C; Item Type: Optocouplers; Number of Channels: 1; Reverse Breakdown Voltage: 6V; Forward Voltage: 1.4V; Forward Current: 50mA; Rise Time: 18000ns; Max Power Dissipation: 200mW; Collector Emitter Voltage (VCEO): 35V; Collector Emitter Saturation Voltage: 200mV; Power Dissipation: 70mW; Current Transfer Ratio: 400%; Input Type: DC; Supplier: Digikey; LCSC Part Number: C109227; RoHS: Yes; Stock: 4949; Pricing: 1=0.5, 10=0.291, 100=0.1856, 500=0.14438 (USD); Mounting Technology: Surface Mount; Case/Package: SMD/SMT; Pins: 4; Min Operating Temperature: -30°C; Max Operating Temperature: 110°C; Packaging: Tape and Reel; Package Quantity: 1000; Max Collector Current: 50mA; Max Output Voltage: 35V; Output Current per Channel: 50mA; Number of Elements: 1; Fall Time: 18000ns; Isolation Voltage: 5kV; Max Input Current: 50mA; Series: -; Collector-emitter Voltage-Max: 200mV; Isolation Voltage-Max: 5kV; Radiation Hardening: No; Lead Free: Lead Free; ComponentLink1URL: https://datasheet.ciiva.com/12240/ltv-817-827-847-12240648.pdf?src-supplier=Mouser; ComponentLink1Description: https://datasheet.ciiva.com/12240/ltv-817-827-847-12240648.pdf?src-supplier=Mouser; ComponentLink2URL: https://datasheet.ciiva.com/2958/s-110-ltv-817m-s-s-ta-s-ta1-s-tpseries20130925-2958797.pdf?src-supplier=Digikey; ComponentLink2Description: https://datasheet.ciiva.com/2958/s-110-ltv-817m-s-s-ta-s-ta1-s-tpseries20130925-2958797.pdf?src-supplier=Digikey
footprint LTV-817S-TA1-C
pins: 1 An, 2 Ca, 3 E, 4 C

## LYL29K-H1K2-26-Z
designator LED?
LED YELLOW DIFFUSED 0603 SMD; Manufacturer: Osram Opto; Manufacturer Part Number: LYL29K-H1K2-26-Z; Item Type: LEDs; Lens Color: White; Viewing Angle: 160°; Lens Style: Flat,Diffused,Colorless; Forward Current: 20mA; Forward Voltage: 2.2V; Luminous Intensity: 11.2mcd; Test Current: 2mA; Dominant Wavelength: 587nm; Luminous Flux: 0.028lm; Number of Elements: 1; Reverse Voltage: 12V; Lens Size: 0.8mm; Supplier: Avnet; LCSC Part Number: C6897380; RoHS: Yes; Stock: 30000; Pricing: 5000=0.05389, 10000=0.05236, 20000=0.05083, 30000=0.0493, 40000=0.04778 (USD); Mounting Technology: Surface Mount; Case/Package: 0603; Pins: 2; Color: Yellow; Case Code (Metric): 1608; Case Code (Imperial): 0603; Min Operating Temperature: -40°C; Max Operating Temperature: 100°C; Package Quantity: 5000; Packaging: Tape and Reel; Illumination Color: Yellow; Lens Transparency: Diffused; Series: SMARTLED® 0603; Wavelength: 587nm; Length: 1.3mm; Width: 0.8mm; Height: 0.65mm; Depth: 0.8mm; Radiation Hardening: No; Lead Free: 5697LeadFree; ComponentLink1URL: https://datasheet.ciiva.com/26920/getdatasheetpartid-774632-26920797.pdf?src-supplier=Verical; ComponentLink1Description: https://datasheet.ciiva.com/26920/getdatasheetpartid-774632-26920797.pdf?src-supplier=Verical; ComponentLink2URL: https://datasheet.ciiva.com/2112/00077106-0-2112836.pdf?src-supplier=Digikey; ComponentLink2Description: https://datasheet.ciiva.com/2112/00077106-0-2112836.pdf?src-supplier=Digikey; ComponentLink3URL: https://datasheet.ciiva.com/2112/00077106-0-2112837.pdf?src-supplier=Digikey; ComponentLink3Description: https://datasheet.ciiva.com/2112/00077106-0-2112837.pdf?src-supplier=Digikey; ComponentLink4URL: https://datasheet.ciiva.com/4688/lyl29k-smartled0603-471955-4688317.pdf?src-supplier=Mouser; ComponentLink4Description: https://datasheet.ciiva.com/4688/lyl29k-smartled0603-471955-4688317.pdf?src-supplier=Mouser; ComponentLink5URL: https://datasheet.ciiva.com/2112/00077106-0-2112835.pdf?src-supplier=Digikey; ComponentLink5Description: https://datasheet.ciiva.com/2112/00077106-0-2112835.pdf?src-supplier=Digikey
footprint LED-0603
pins: 1, 2

## MHK1363CGBTD
designator LED?, comment Green
Plugin,P=2.54mm Light Emitting Diodes (LED) ROHS; Manufacturer: MEIHUA; Manufacturer Part Number: MHK1363CGBTD; ComponentLink1Description: LCSC; ComponentLink1URL: https://www.lcsc.com/product-detail/Light-Emitting-Diodes-LED_MEIHUA-MHK1363CGBTD_C3028846.html; Package: Plugin,P=2.54mm; LCSC Part Number: C3028846; Item Type: LED
footprint MHK1363CGBTD
pins: 1, 2

## MHP5050RGBDT
designator LED?
20mA White Diffused -40℃~+85℃ RGB SMD5050 Light Emitting Diodes (LED) ROHS; Manufacturer: MEIHUA; Manufacturer Part Number: MHP5050RGBDT; Item Type: RGB LED; LCSC Part Number: C409780; Package: SMD5050; ComponentLink1Description: LCSC; ComponentLink1URL: https://www.lcsc.com/product-detail/Light-Emitting-Diodes-LED_MEIHUA-MHP5050RGBDT_C409780.html
footprint MHP5050RGBDT
pins: 1, 2, 3, 4, 5, 6

## MHS110FRGBCT
designator LED?
Colorless transparence Side stickers -40℃~+85℃ Common anode RGB 120° 60mW SMD,1.5x3.2mm Light Emitting Diodes (LED) ROHS; Manufacturer: MEIHUA; Manufacturer Part Number: MHS110FRGBCT; Item Type: RGB LED; Package: SMD,1.5x3.2mm; LCSC Part Number: C496820; ComponentLink1Description: LCSC; ComponentLink1URL: https://www.lcsc.com/product-detail/Light-Emitting-Diodes-LED_MEIHUA-MHS110FRGBCT_C496820.html
footprint MHS110FRGBCT
pins: 1 +, 2 -BLUE, 3 -GREEN, 4 -RED

## MOC3022
designator U?
OPTOISOLATOR 5KV TRIAC 6DIP; Manufacturer: Vishay Lite-On; Manufacturer Part Number: MOC3022; Item Type: Optocoupler; Supplier: Rs; Supplier Part Number: 1689685; RoHS: Yes; Category: Optocouplers; Stock: 90; Pricing: 65=0.284 (GBP); ComponentLink1URL: https://datasheet.ciiva.com/11772/0900766b80de6ded-11772106.pdf?src-supplier=Rs; ComponentLink1Description: https://datasheet.ciiva.com/11772/0900766b80de6ded-11772106.pdf?src-supplier=Rs; ComponentLink2URL: https://datasheet.ciiva.com/2093/s-110-moc3020thrumoc3023series-2093015.pdf?src-supplier=Digi-Key; ComponentLink2Description: https://datasheet.ciiva.com/2093/s-110-moc3020thrumoc3023series-2093015.pdf?src-supplier=Digi-Key; LCSC Part Number: C115466
footprint 6 Pin Dip
pins: 1 An, 2 Ca, 3 NC, 4 Terminal, 5 Substrate, 6 Terminal

## MOC3023M
designator U?
OPTOISOLATOR 4.17KV TRIAC 6DIP; Manufacturer: ON Semiconductor / Fairchild; Manufacturer Part Number: MOC3023M; Item Type: IC; Supplier: Future Electronics; LCSC Part Number: C5240; RoHS: Yes; Stock: 46500; Pricing: 1=0.215, 200=0.205, 750=0.196, 2500=0.19, 10000=0.176 (USD); ComponentLink1URL: https://datasheet.ciiva.com/15118/getdatasheetpartid-110426-15118245.pdf?src-supplier=Verical; ComponentLink1Description: https://datasheet.ciiva.com/15118/getdatasheetpartid-110426-15118245.pdf?src-supplier=Verical; ComponentLink2URL: https://datasheet.ciiva.com/8074/1806097-8074079.pdf?src-supplier=Element14; ComponentLink2Description: https://datasheet.ciiva.com/8074/1806097-8074079.pdf?src-supplier=Element14; ComponentLink3URL: https://datasheet.ciiva.com/8084/moc3023m-8084955.pdf?src-supplier=Avnet; ComponentLink3Description: https://datasheet.ciiva.com/8084/moc3023m-8084955.pdf?src-supplier=Avnet; ComponentLink4URL: https://datasheet.ciiva.com/2092/moc3010m-2092979.pdf?src-supplier=Digikey; ComponentLink4Description: https://datasheet.ciiva.com/2092/moc3010m-2092979.pdf?src-supplier=Digikey
footprint 6 Pin Dip
pins: 1 An, 2 Ca, 3 NC, 4 Terminal, 5 Substrate, 6 Terminal

## MOC3063
designator U?
OPTOISOLATOR 5KV TRIAC 6DIP; Manufacturer: Vishay Lite-On; Manufacturer Part Number: MOC3063; Item Type: IC; Supplier: Rs; Supplier Part Number: 1689692; RoHS: Yes; Category: Optocouplers; Stock: 1109; Pricing: 65=0.362 (GBP); ComponentLink1URL: https://datasheet.ciiva.com/15118/getdatasheetpartid-141776-15118268.pdf?src-supplier=Verical; ComponentLink1Description: https://datasheet.ciiva.com/15118/getdatasheetpartid-141776-15118268.pdf?src-supplier=Verical; ComponentLink2URL: https://datasheet.ciiva.com/11771/0900766b80de6dee-11771947.pdf?src-supplier=Rs; ComponentLink2Description: https://datasheet.ciiva.com/11771/0900766b80de6dee-11771947.pdf?src-supplier=Rs; LCSC Part Number: C78487
footprint 6 Pin Dip
pins: 1 An, 2 Ca, 3 NC, 4 Terminal, 5 Substrate, 6 Terminal

## MOC3083SR2M
designator U?
OPTOISOLATOR 4.17KV TRIAC 6SMD; Manufacturer: ON Semiconductor / Fairchild; Manufacturer Part Number: MOC3083SR2M; Number of Channels: 1; Hold Current: 500uA; Nominal Supply Voltage: 1.3V; Max Supply Voltage: 1.5V; Forward Current: 60mA; Output Voltage: 800V; Reverse Breakdown Voltage: 6V; Max Power Dissipation: 250mW; Isolation Voltage: 4.2kV; Isolation Voltage-Max: 7.5kV; Item Type: IC; Supplier: Future Electronics; LCSC Part Number: C111561; RoHS: Yes; Stock: 26000; Pricing: 1000=0.365, 2000=0.355, 3000=0.35, 4000=0.345, 5000=0.335 (USD); Mounting Technology: Surface Mount; Case/Package: SMD/SMT; Pins: 6; Weight: 0.81g; Min Operating Temperature: -40°C; Max Operating Temperature: 85°C; Packaging: Tape and Reel; Forward Voltage: 1.3V; Max Input Current: 60mA; Number of Elements: 1; Power Dissipation: 250mW; Max Output Voltage: 800V; Input Current: 60mA; Number of Circuits: 1; Series: -; Reverse Voltage: 6V; Height: 4.8mm; Radiation Hardening: No; Reach SVHC Compliant: No; Lead Free: Lead Free; RoHS Compliant: Yes; ComponentLink1URL: https://datasheet.ciiva.com/25620/0900766b810df541-25620726.pdf?src-supplier=Rs; ComponentLink1Description: https://datasheet.ciiva.com/25620/0900766b810df541-25620726.pdf?src-supplier=Rs; ComponentLink2URL: https://datasheet.ciiva.com/15118/getdatasheetpartid-67311-15118215.pdf?src-supplier=Verical; ComponentLink2Description: https://datasheet.ciiva.com/15118/getdatasheetpartid-67311-15118215.pdf?src-supplier=Verical; ComponentLink3URL: https://datasheet.ciiva.com/2093/moc3083m-2093280.pdf?src-supplier=Digikey; ComponentLink3Description: https://datasheet.ciiva.com/2093/moc3083m-2093280.pdf?src-supplier=Digikey; ComponentLink4URL: https://datasheet.ciiva.com/16744/moc3083m-16744701.pdf?src-supplier=Future+Electronics; ComponentLink4Description: https://datasheet.ciiva.com/16744/moc3083m-16744701.pdf?src-supplier=Future+Electronics; ComponentLink5URL: https://datasheet.ciiva.com/8099/moc3081m-8099621.pdf?src-supplier=Avnet; ComponentLink5Description: https://datasheet.ciiva.com/8099/moc3081m-8099621.pdf?src-supplier=Avnet; ComponentLink6URL: https://datasheet.ciiva.com/2093/moc3083m-2093279.pdf?src-supplier=Digikey; ComponentLink6Description: https://datasheet.ciiva.com/2093/moc3083m-2093279.pdf?src-supplier=Digikey; ComponentLink7URL: https://datasheet.ciiva.com/2093/moc3083m-2093278.pdf?src-supplier=Digikey; ComponentLink7Description: https://datasheet.ciiva.com/2093/moc3083m-2093278.pdf?src-supplier=Digikey
footprint SMD-6P
pins: 1, 2, 3 NC, 4, 5 NC, 6

## NCD0603B3
designator LED?, comment Blue
blue 0603 Light Emitting Diodes (LED) ROHS; Manufacturer: Foshan NationStar Optoelectronics; Manufacturer Part Number: NCD0603B3; Package: 0603; LCSC Part Number: C158101; Item Type: LED; ComponentLink1Description: LCSC; ComponentLink1URL: https://www.lcsc.com/product-detail/Light-Emitting-Diodes-LED_Foshan-NationStar-Optoelectronics-NCD0603B3_C158101.html
footprint LED-0603
pins: 1, 2

## NCD0603G2
designator LED?, comment Emerald
Emerald 0603 Light Emitting Diodes (LED) ROHS; Manufacturer: Foshan NationStar Optoelectronics; Manufacturer Part Number: NCD0603G2; Package: 0603; LCSC Part Number: C87326; Item Type: LED; ComponentLink1Description: LCSC; ComponentLink1URL: https://www.lcsc.com/product-detail/Light-Emitting-Diodes-LED_Foshan-NationStar-Optoelectronics-NCD0603G2_C87326.html
footprint LED-0603
pins: 1, 2